# Altium footprint library Switch$.PcbLib: 117 footprints (part 3 of 8)
Each footprint in its own frame and in the unit in brackets; x right, y up, seen from the top. Pads: shape width x height; smd on the part's side, far side on the other; paste and mask are expansions set on the pad; w line width, h text height; cw(c..) or ccw(c..) is an arc to the next point about the centre after c.
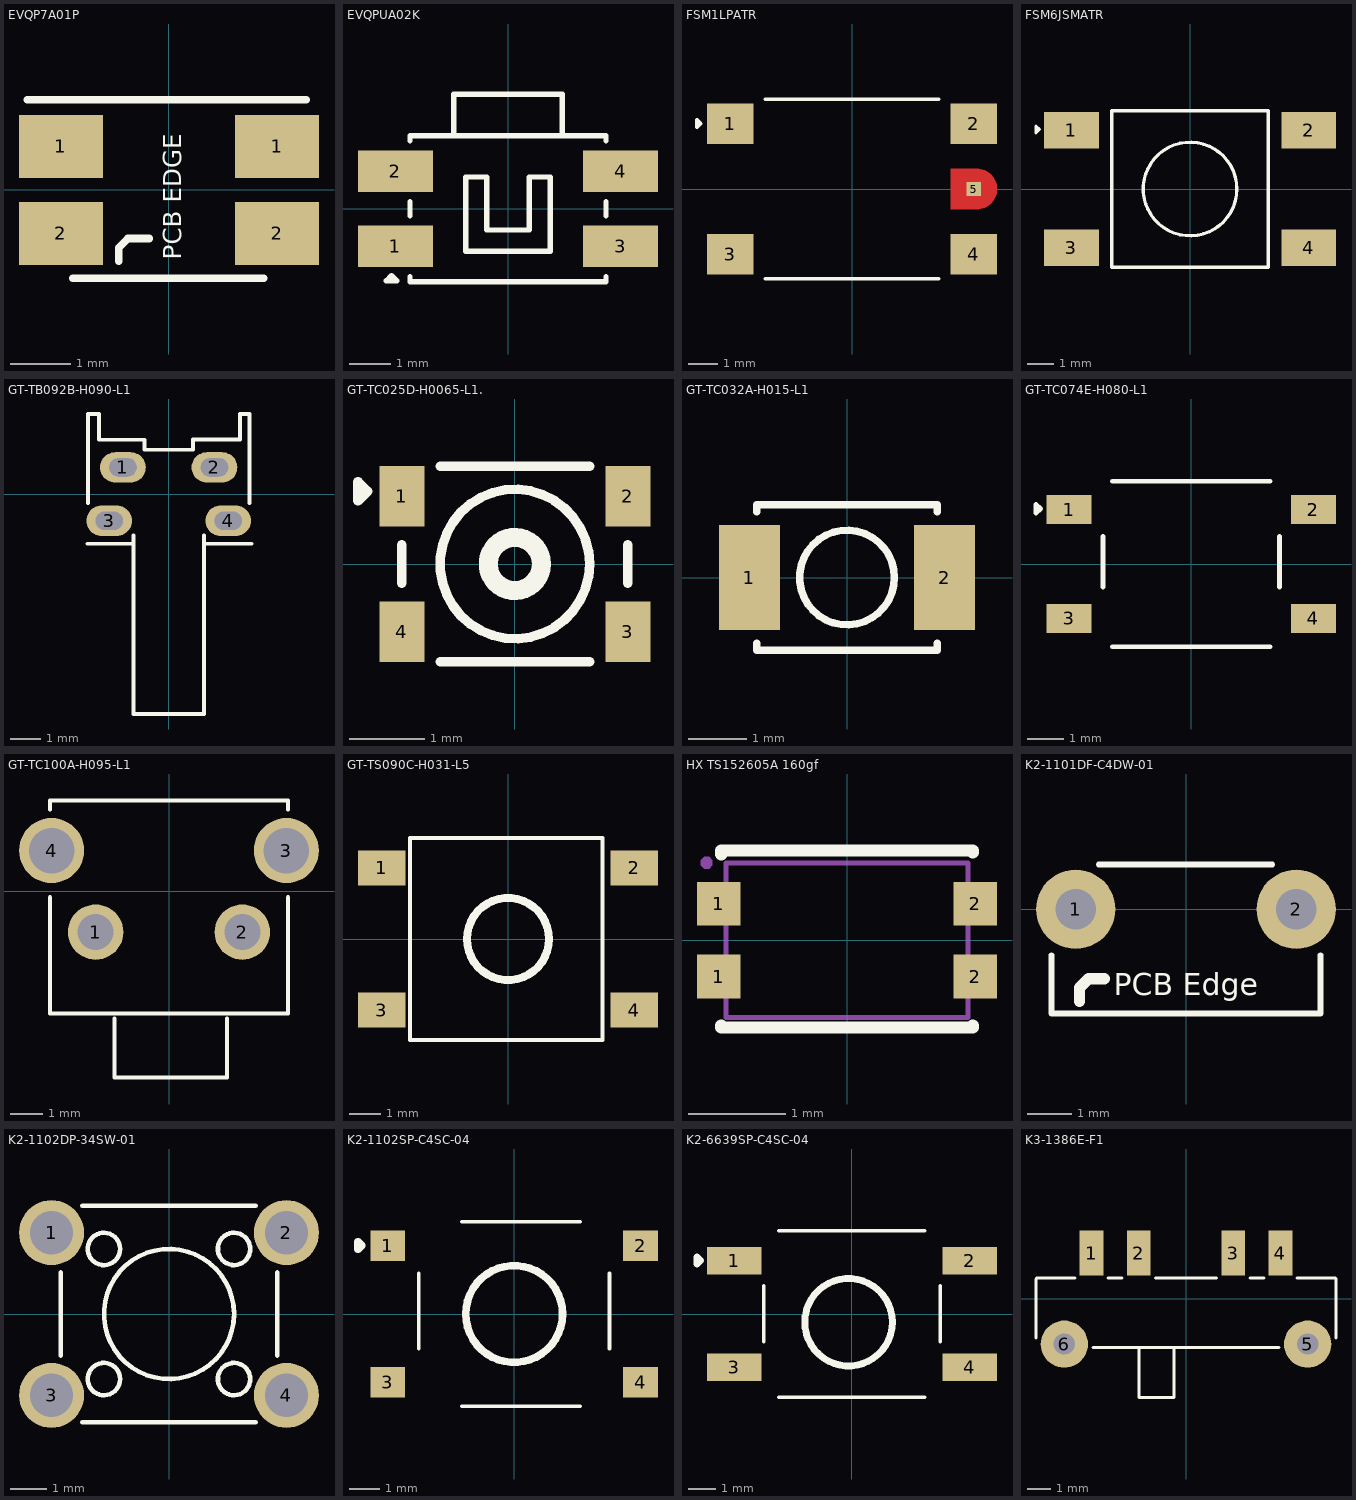
[diagram p2: the footprints below, top view; thin cyan lines are the x and y axes]

## EVQP7A01P [mm]
pads (4):
  rect 1.4x1.05 smd: 1(-1.8,0.725) 1(1.8,0.725) 2(-1.8,-0.725) 2(1.8,-0.725)
Top Overlay:
  lines w0.127: -2.362,1.499 2.286,1.499 ; -1.6,-1.473 1.575,-1.473 ; -0.838,-1.194 -0.838,-0.965 -0.686,-0.813 -0.33,-0.813
  text "PCB EDGE" at 0.205,-1.17 h0.3
3D body "EVQ-P7A01P--3DModel-STEP-269445.STEP": height 1.35, standoff 0, extent -2.35,-2.1 2.35,1.45

## EVQPUA02K [mm]
pads (4):
  rect 1.8x1 smd: 1(-2.7,-0.9) 2(-2.7,0.9) 3(2.7,-0.9) 4(2.7,0.9)
Top Overlay:
  lines w0.127: -2.35,-1.631 -2.35,-1.75 2.35,-1.75 2.35,-1.631 ; -2.35,-0.169 -2.35,0.169 ; -2.35,1.631 -2.35,1.75 2.35,1.75 2.35,1.631 ; -1.3,1.75 -1.3,2.75 1.3,2.75 1.3,1.75 ; 2.35,-0.169 2.35,0.169 ; -2.921,-1.727 -2.667,-1.727 -2.794,-1.6 -2.921,-1.727 ; -1.016,-1.016 -1.016,0.762 -0.508,0.762 -0.508,-0.508 0.508,-0.508 0.508,0.762 1.016,0.762 1.016,-1.016 -1.016,-1.016
3D body "C2686883.STEP": height 1.65, standoff -0.01, extent -3.2,-1.75 3.2,2.751

## FSM1LPATR [mm]
pads (5):
  rect 1.6x1.395 smd: 1(-4.205,2.248) 2(4.205,2.248) 3(-4.205,-2.248) 4(4.205,-2.248)
  rect 0.5x0.5 smd paste-1 mask+0: 5(4.205,0)
Top Layer:
  region: 4.378,0.696 4.451,0.685 4.521,0.666 4.59,0.639 4.655,0.606 4.716,0.566 4.773,0.52 4.825,0.468 4.871,0.411 4.911,0.35 4.944,0.285 4.971,0.216 4.99,0.146 5.001,0.073 5.005,0 5.001,-0.073 4.99,-0.146 4.971,-0.216 4.944,-0.285 4.911,-0.35 4.871,-0.411 4.825,-0.468 4.773,-0.52 4.716,-0.566 4.655,-0.606 4.59,-0.639 4.521,-0.666 4.451,-0.685 4.378,-0.696 4.305,-0.7 3.405,-0.7 3.405,0.7 4.305,0.7
Top Overlay:
  lines w0.127: -2.995,-3.1 2.995,-3.1 ; -2.995,3.1 2.995,3.1 ; -5.352,2.131 -5.225,2.258 -5.352,2.385 -5.352,2.131
3D body "c-1-1437565-8-d1-3d.stp": height 3.11, standoff 0.01, extent -4,-3.1 4,3.1

## FSM6JSMATR [mm]
pads (4):
  rect 2.1x1.4 smd: 1(-4.55,2.25) 2(4.55,2.25) 3(-4.55,-2.25) 4(4.55,-2.25)
Top Overlay:
  circle w0.127: c0,0 r1.796
  lines w0.127: -5.911,2.157 -5.911,2.411 -5.784,2.284 -5.911,2.157 ; -3,-3 -3,3 3,3 3,-3 -3,-3
3D body "FSM6JSMATR--3DModel-STEP-510211.STEP": height 7.26, standoff 0, extent -5,-3 5,3

## GT-TB092B-H090-L1 [mm]
pads (4):
  oval 1.5x1 hole 0.6 slot 0.9 at 0 deg: 1(-1.5,0.875) 2(1.5,0.875) 3(-1.95,-0.875) 4(1.95,-0.875)
Top Overlay:
  lines w0.127: -2.663,-1.629 -1.15,-1.629 ; -2.65,-0.299 -2.65,2.625 -2.28,2.625 -2.28,1.782 -0.799,1.782 -0.799,1.452 0.321,1.452 0.801,1.452 ; -1.15,-1.362 -1.15,-7.208 1.15,-7.208 1.15,-1.362 ; 0.802,1.452 0.801,1.452 ; 1.237,-1.629 2.718,-1.629 ; 2.65,-0.299 2.65,2.625 2.34,2.625 2.34,1.792 0.801,1.792 0.801,1.452
3D body "C5446822.step": height 5.1, standoff -1.5, extent -2.655,-7.242 2.655,2.658

## GT-TC025D-H0065-L1. [mm]
pads (4):
  rect 0.6x0.8 smd: 1(-1.5,0.9) 2(1.5,0.9) 3(1.5,-0.9) 4(-1.5,-0.9)
Top Overlay:
  circle w0.127: c0,0 r0.992
  circle w0.254: c0,0 r0.353
  lines w0.127: -1.5,-0.253 -1.5,0.253 ; -0.991,-1.3 0.991,-1.3 ; -0.991,1.3 0.991,1.3 ; 1.5,-0.253 1.5,0.253 ; -2.083,0.838 -2.083,1.092 -1.956,0.965 -2.083,0.838
3D body "2009031909_G-Switch-GT-TC025D-H0065-L1_C778132.STEP": height 0.6, standoff -0.05, extent -1.7,-1.3 1.7,1.3

## GT-TC032A-H015-L1 [mm]
pads (2):
  rect 1.05x1.8 smd: 1(-1.675,0) 2(1.675,0)
Top Overlay:
  circle w0.127: c0,0 r0.813
  lines w0.127: -1.55,-1.131 -1.55,-1.25 1.55,-1.25 1.55,-1.131 ; -1.55,1.131 -1.55,1.25 1.55,1.25 1.55,1.131
3D body "User Library-OMRON B3U1000P.step": height 1.6, standoff 0, extent -2,-1.263 2,1.237

## GT-TC074E-H080-L1 [mm]
pads (4):
  rect 1.25x0.8 smd: 1(-3.375,1.5) 2(3.375,1.5) 3(-3.375,-1.5) 4(3.375,-1.5)
Top Overlay:
  lines w0.127: -2.438,-0.635 -2.438,0.762 ; -2.184,-2.286 2.184,-2.286 ; -2.184,2.286 2.184,2.286 ; 2.438,-0.635 2.438,0.762 ; -4.289,1.398 -4.162,1.525 -4.289,1.652 -4.289,1.398
3D body "G-Switch GT-TC074E-H080-L1.STEP": height 8, standoff 0, extent -3.75,-2.255 3.75,2.245

## GT-TC100A-H095-L1 [mm]
pads (4):
  round 1.7 hole 1.1 paste-2539.97 mask+0.051: 1(-2.25,-1.25) 2(2.25,-1.25)
  round 2 hole 1.4 paste-2539.97 mask+0.051: 3(3.6,1.25) 4(-3.6,1.25)
Top Overlay:
  lines w0.127: -3.65,-0.181 -3.65,-3.75 3.65,-3.75 3.65,-0.181 ; -3.65,2.511 -3.65,2.79 3.65,2.79 3.65,2.511 ; -1.666,-3.899 -1.666,-5.713 1.778,-5.713 1.778,-3.899
3D body "C2829964.step": height 7.38, standoff -3.5, extent -4.183,-5.205 4.184,2.845

## GT-TS090C-H031-L5 [mm]
pads (4):
  rect 1.5x1.1 smd paste+0 mask+0.051: 1(-4,2.25) 2(4,2.25) 3(-4,-2.25) 4(4,-2.25)
Top Overlay:
  circle w0.254: c0,0 r1.3
  lines w0.127: -3.1,-3.2 3,-3.2 3,3.2 -3.1,3.2 -3.1,-3.2
3D body "C2686883.step": height 4.91, standoff 0, extent -4,-3.2 4,3.2

## HX TS152605A 160gf [mm]
pads (4):
  rect 0.45x0.45 smd: 1(-1.325,-0.375) 1(-1.325,0.375) 2(1.325,-0.375) 2(1.325,0.375)
Top Overlay:
  lines w0.127: -1.3,-0.882 -1.3,-0.902 -1.2,-0.902 1.3,-0.902 1.3,-0.882 ; -1.3,0.889 -1.3,0.927 1.3,0.927 1.3,0.907
Top Courtyard:
  region: 1.15,0.2 1.15,0.55 1.45,0.55 1.45,0.2
  region: 1.15,-0.55 1.15,-0.2 1.45,-0.2 1.45,-0.55
  region: -1.45,-0.55 -1.45,-0.2 -1.15,-0.2 -1.15,-0.55
  region: -1.45,0.2 -1.45,0.55 -1.15,0.55 -1.15,0.2
  region: -1.39,0.8 -1.39,0.775 -1.425,0.74 -1.475,0.74 -1.51,0.775 -1.51,0.8 -1.51,0.825 -1.475,0.86 -1.425,0.86 -1.39,0.825
  lines w0.051: -1.25,-0.8 1.25,-0.8 1.25,0.8 -1.25,0.8 -1.25,-0.8
3D body "C25168822.step": height 0.55, standoff 0, extent -1.45,-0.85 1.45,0.85

## K2-1101DF-C4DW-01 [mm]
pads (2):
  round 1.8 hole 0.92: 1(-2.5,0) 2(2.5,0)
Top Overlay:
  lines w0.127: -3.048,-1.041 -3.048,-2.362 3.048,-2.362 3.048,-1.041 ; -1.981,1.016 1.956,1.016
  lines w0.254: -2.413,-2.083 -2.413,-1.778 -2.21,-1.575 -1.854,-1.575
  text "PCB Edge" at -1.633,-1.949 h0.5
3D body "3D_PCB_NEW_PCB_2023-07-12_2023-07-12 (1).STEP": height 3.45, standoff -3.4, extent -2.997,-4.039 3.003,0.961

## K2-1102DP-34SW-01 [mm]
pads (4):
  round 1.8 hole 1.2 paste-2539.97 mask+0.051: 1(-3.25,2.25) 2(3.25,2.25) 3(-3.25,-2.25) 4(3.25,-2.25)
Top Overlay:
  circle w0.127: c1.8,-1.8 r0.447
  circle w0.127: c-1.8,-1.8 r0.447
  circle w0.127: c-1.8,1.8 r0.447
  circle w0.127: c1.8,1.8 r0.447
  circle w0.127: c0,0 r1.8
  lines w0.127: -3,-1.147 -3,1.147 ; -2.404,-3 2.404,-3 ; -2.404,3 2.404,3 ; 3,-1.147 3,1.147
3D body "K2-1102DP-34SW-01-NEW.STEP": height 18.01, standoff -2.91, extent -3.984,-2.93 4.031,2.93

## K2-1102SP-C4SC-04 [mm]
pads (4):
  rect 1.15x1 smd: 1(-4.175,2.25) 2(4.175,2.25) 3(-4.175,-2.25) 4(4.175,-2.25)
Top Overlay:
  circle w0.254: c0,0 r1.599
  lines w0.127: -3.15,-1.143 -3.15,1.346 ; -1.727,-3.048 2.184,-3.048 ; -1.727,3.048 2.184,3.048 ; 3.15,-1.143 3.15,1.346
  lines w0.254: -5.156,2.134 -5.029,2.261 -5.156,2.388 -5.156,2.134
3D body "User Library-FSM4JSMATR - TE Connectivity - SPST 6mm Tactile Switch revised.STEP": height 5.07, standoff 0.1, extent -4.75,-3 4.75,3

## K2-6639SP-C4SC-04 [mm]
pads (4):
  rect 2x1 smd: 1(-4.3,1.95) 2(4.3,1.95) 3(-4.3,-1.95) 4(4.3,-1.95)
Top Overlay:
  circle w0.254: c-0.125,-0.3 r1.599
  lines w0.127: -3.226,-1.016 -3.226,1.041 ; -2.667,-3.048 2.667,-3.048 ; -2.667,3.048 2.667,3.048 ; 3.226,-1.016 3.226,1.041
  lines w0.254: -5.662,1.834 -5.535,1.961 -5.662,2.088 -5.662,1.834
3D body "K2-6639SP-C4SC-04.STEP": height 5, standoff 0, extent -4.5,-3 4.5,3

## K3-1386E-F1 [mm]
pads (6):
  rect 1x1.9 smd paste-100 mask+0.051: 1(-4,1.925) 2(-2,1.925) 3(2,1.925) 4(4,1.925)
  round 2 hole 0.9 paste-2539.97 mask+0.051: 5(5.15,-1.925) 6(-5.15,-1.925)
Top Overlay:
  lines w0.127: -6.35,-1.659 -6.35,0.838 -6.321,0.867 -4.704,0.867 ; -3.928,-2.075 3.928,-2.075 ; -3.296,0.867 -2.704,0.867 ; -2,-2.075 -2,-4.175 -0.5,-4.175 -0.5,-2.075 ; -1.296,0.867 1.296,0.867 ; 2.704,0.867 3.296,0.867 ; 4.704,0.867 6.333,0.867 6.35,0.85 6.35,-1.659
Top Paste:
  drawing of 6 lines, arcs and shapes, not listed
3D body "C2690044.step": height 2, standoff -0.65, extent -6.365,-4.049 6.335,2.651